# Altium schematic symbol library SSB44-E3_5BT.SchLib: 1 symbol
Pins are listed as number, name and electrical type; pins without a type are passive.

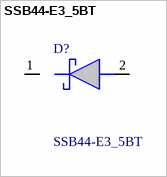
[diagram p0: symbol SSB44-E3_5BT]

## SSB44-E3_5BT
designator D?
Rectifier Diode Schottky 40V 4A 2-Pin SMB T/R; Manufacturer_Name: Vishay; Manufacturer_Part_Number: SSB44-E3/5BT; Geometry.Height: 2.44mm; Mouser Part Number: 625-SSB44-E3/5BT; Mouser Price/Stock: https://www.mouser.co.uk/ProductDetail/Vishay-General-Semiconductor/SSB44-E3-5BT?qs=x2jpVgRnAtPlxEbHZNqb7g%3D%3D; Datasheet Link: http://www.vishay.com/docs/88884/ssb43l.pdf
footprint DIOM5436X244N
pins: 1 K, 2 A